# Altium footprint library SBC_PcbLib.PcbLib: 52 footprints (part 2 of 4)
Each footprint in its own frame and in the unit in brackets; x right, y up, seen from the top. Pads: shape width x height; smd on the part's side, far side on the other; paste and mask are expansions set on the pad; w line width, h text height; cw(c..) or ccw(c..) is an arc to the next point about the centre after c.
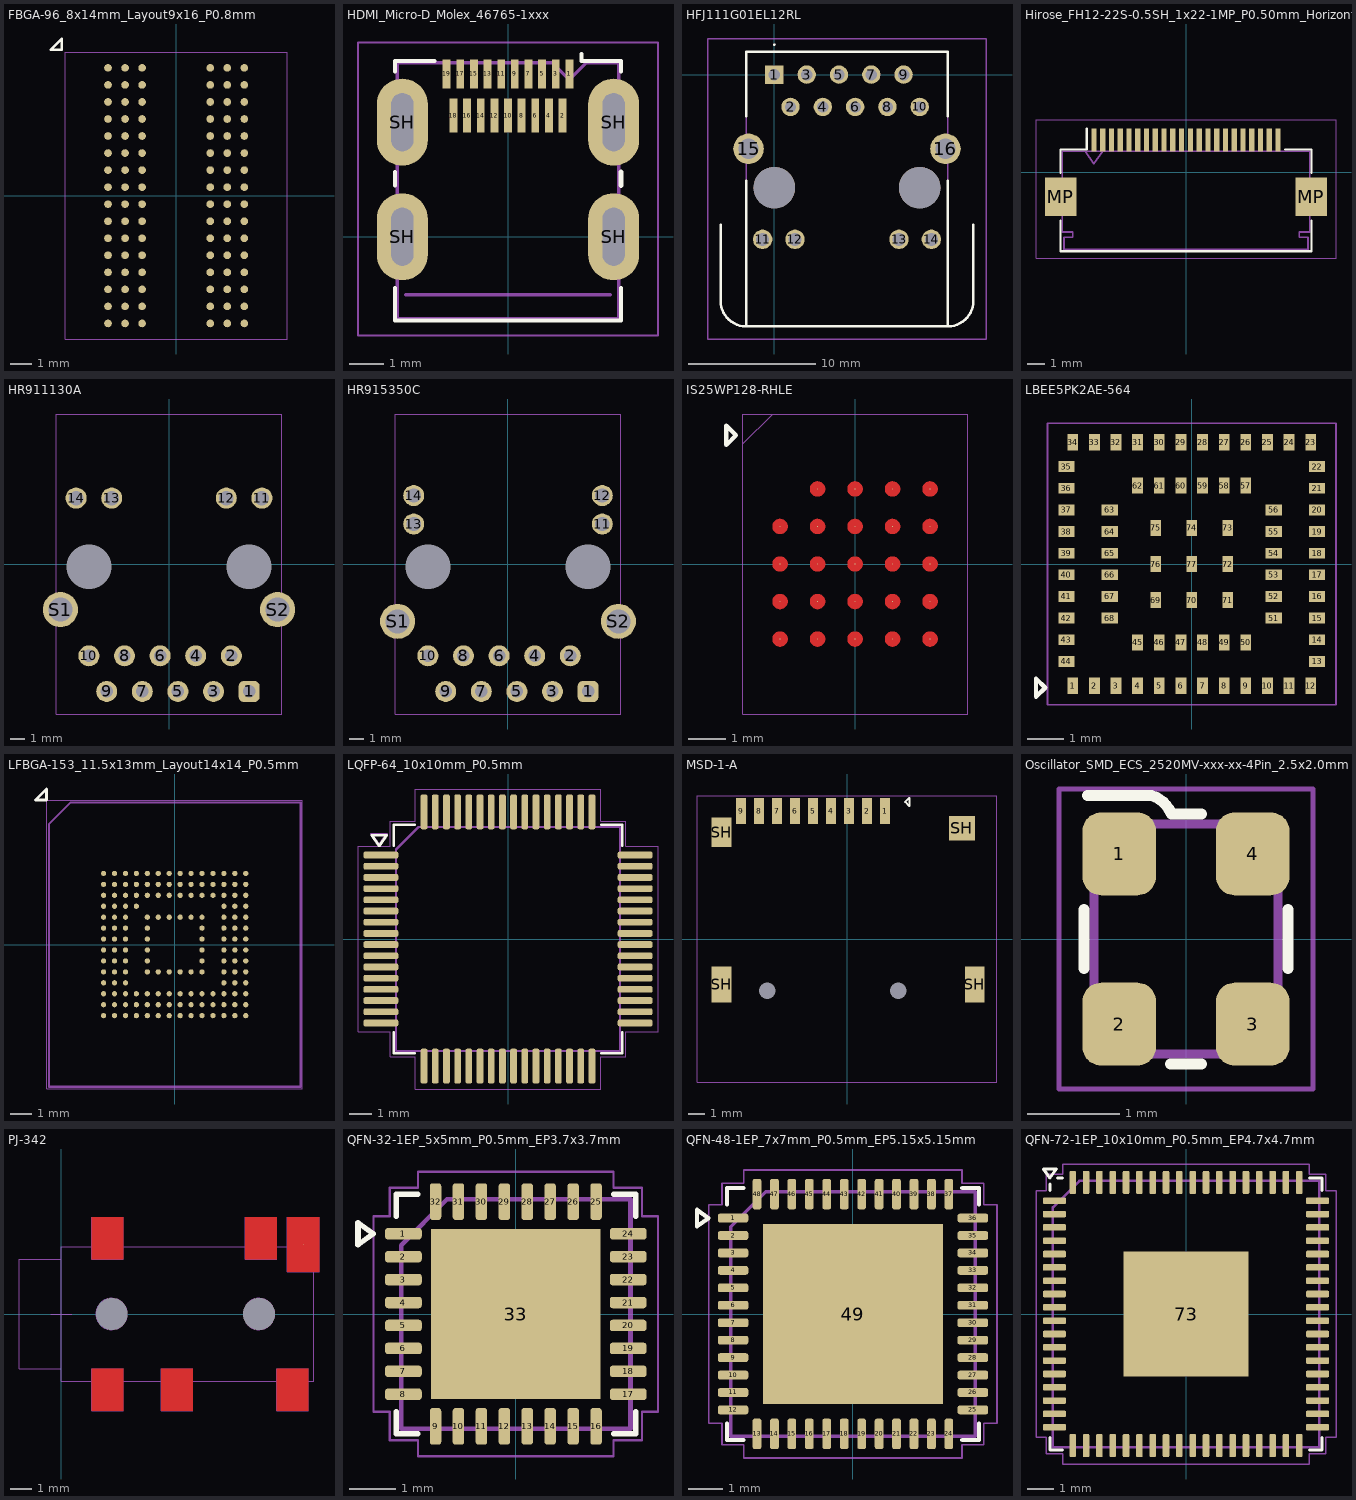
[diagram p1: the footprints below, top view; thin cyan lines are the x and y axes]

## FBGA-96_8x14mm_Layout9x16_P0.8mm [mm] "FBGA-96, 8.0x14.0mm, 96 Ball, 9x16 Layout, 0.8mm Pitch, generalized from https://www.micron.com/-/media/client/global/documents/products/data-sheet/dram/ddr3/4gb_ddr3l.pdf#page=28"
pads (96):
  round 0.36 smd: A1(-3.2,6) A2(-2.4,6) A3(-1.6,6) A7(1.6,6) A8(2.4,6) A9(3.2,6) B1(-3.2,5.2) B2(-2.4,5.2) B3(-1.6,5.2) B7(1.6,5.2) B8(2.4,5.2) B9(3.2,5.2) C1(-3.2,4.4) C2(-2.4,4.4) C3(-1.6,4.4) C7(1.6,4.4) C8(2.4,4.4) C9(3.2,4.4) D1(-3.2,3.6) D2(-2.4,3.6) D3(-1.6,3.6) D7(1.6,3.6) D8(2.4,3.6) D9(3.2,3.6) E1(-3.2,2.8) E2(-2.4,2.8) E3(-1.6,2.8) E7(1.6,2.8) E8(2.4,2.8) E9(3.2,2.8) F1(-3.2,2) F2(-2.4,2) F3(-1.6,2) F7(1.6,2) F8(2.4,2) F9(3.2,2) G1(-3.2,1.2) G2(-2.4,1.2) G3(-1.6,1.2) G7(1.6,1.2) G8(2.4,1.2) G9(3.2,1.2) H1(-3.2,0.4) H2(-2.4,0.4) H3(-1.6,0.4) H7(1.6,0.4) H8(2.4,0.4) H9(3.2,0.4) J1(-3.2,-0.4) J2(-2.4,-0.4) J3(-1.6,-0.4) J7(1.6,-0.4) J8(2.4,-0.4) J9(3.2,-0.4) K1(-3.2,-1.2) K2(-2.4,-1.2) K3(-1.6,-1.2) K7(1.6,-1.2) K8(2.4,-1.2) K9(3.2,-1.2) L1(-3.2,-2) L2(-2.4,-2) L3(-1.6,-2) L7(1.6,-2) L8(2.4,-2) L9(3.2,-2) M1(-3.2,-2.8) M2(-2.4,-2.8) M3(-1.6,-2.8) M7(1.6,-2.8) M8(2.4,-2.8) M9(3.2,-2.8) N1(-3.2,-3.6) N2(-2.4,-3.6) N3(-1.6,-3.6) N7(1.6,-3.6) N8(2.4,-3.6) N9(3.2,-3.6) P1(-3.2,-4.4) P2(-2.4,-4.4) P3(-1.6,-4.4) P7(1.6,-4.4) P8(2.4,-4.4) P9(3.2,-4.4) R1(-3.2,-5.2) R2(-2.4,-5.2) R3(-1.6,-5.2) R7(1.6,-5.2) R8(2.4,-5.2) R9(3.2,-5.2) T1(-3.2,-6) T2(-2.4,-6) T3(-1.6,-6) T7(1.6,-6) T8(2.4,-6) T9(3.2,-6)
Top Overlay:
  lines w0.12: -5.88,6.856 -5.38,7.356 -5.38,6.856 -5.88,6.856
Top Courtyard:
  lines w0.05: -5.207,-6.731 5.207,-6.731 5.207,6.731 -5.207,6.731 -5.207,-6.731
Top Assembly:
  text ".Designator" at -1.905,-1.397 h1
3D body "K4AAG165WA-BCWE.step": height 1.1, standoff 0, extent -5.15,-6.65 5.15,6.65

## HDMI_Micro-D_Molex_46765-1xxx [mm] "HDMI, Micro, Type D, THT, 0.4mm pitch, 19 ckt, right angle (http://www.molex.com/pdm_docs/sd/467651301_sd.pdf)"
pads (23):
  rect 0.23x0.85 smd: 1(1.8,4.775) 3(1.4,4.775) 5(1,4.775) 7(0.6,4.775) 9(0.2,4.775) 11(-0.2,4.775) 13(-0.6,4.775) 15(-1,4.775) 17(-1.4,4.775) 19(-1.8,4.775)
  rect 0.23x1 smd: 2(1.6,3.55) 4(1.2,3.55) 6(0.8,3.55) 8(0.4,3.55) 10(0,3.55) 12(-0.4,3.55) 14(-0.8,3.55) 16(-1.2,3.55) 18(-1.6,3.55)
  oval 1.5x2.55 hole 0.65 slot 1.7 at 90 deg: SH(-3.1,0) SH(-3.1,3.36) SH(3.1,0) SH(3.1,3.36)
Top Overlay:
  lines w0.12: -3.31,-1.5 -3.31,-2.46 3.31,-2.46 3.31,-1.5 ; -3.31,1.5 -3.31,1.9 ; -3.31,4.85 -3.31,5.16 -2.15,5.16 ; 2.15,5.36 2.15,5.16 3.31,5.16 3.31,4.85
  lines w0.15: 3.31,1.5 3.31,1.9
Top Courtyard:
  lines w0.05: -4.4,-2.9 -4.4,5.7 4.4,5.7 4.4,-2.9 -4.4,-2.9
  lines w0.1: 1.3,5.1 1.8,4.6
Bottom Courtyard:
  lines w0.1: -3,-1.7 3,-1.7
Mechanical 5:
  text "KEEPOUT" at -1.96,0.12 h0.7
Top Assembly:
  lines w0.1: 1.3,5.1 -3.25,5.1 -3.25,-2.4 3.25,-2.4 3.25,5.1 2.3,5.1 1.8,4.6
  text ".Designator" at -4.445,-4.064 h1
3D body "HDMI_Micro-D_Molex_46765-1xxx.step": height 2.9, standoff -0.55, extent -3.25,-2.4 3.25,5.1

## HFJ111G01EL12RL [mm] "HFJ11-1G01E-L12RL-1"
pads (18):
  rect 1.446x1.446 hole 0.89: 1(0,0)
  round 1.446 hole 0.89: 2(1.27,-2.54) 3(2.54,0) 4(3.81,-2.54) 5(5.08,0) 6(6.35,-2.54) 7(7.62,0) 8(8.89,-2.54) 9(10.16,0) 10(11.43,-2.54)
  round 1.53 hole 1.02: 11(-0.92,-12.95) 12(1.62,-12.95) 13(9.8,-12.95) 14(12.34,-12.95)
  round 2.4 hole 1.6: 15(-2.035,-5.84) 16(13.455,-5.84)
  round 3.25 hole 3.25 unplated: ""(-0.005,-8.89) ""(11.425,-8.89)
Top Overlay:
  lines w0.1: 0,2.3 ccw(c0,2.35) 0,2.4 ccw(c0,2.35) 0,2.3
  lines w0.2: -4.23,-11.79 -4.23,-17.79 ccw(c-2.23,-17.79) -2.23,-19.79 ; -2.23,-8.36 -2.23,-19.79 ; -2.23,-3.28 -2.23,1.8 13.65,1.8 13.65,-3.28 ; 13.65,-8.36 13.65,-19.79 ; 15.65,-11.79 15.65,-17.79 cw(c13.65,-17.79) 13.65,-19.79 ; -2.23,-19.79 13.65,-19.79
  text ".Designator" at -0.381,-16.764 h1.27
Mechanical 2:
  lines w0.1: -4.23,-11.79 -4.23,-17.79 ccw(c-2.23,-17.79) -2.23,-19.79 ; 15.65,-11.79 15.65,-17.79 cw(c13.65,-17.79) 13.65,-19.79 ; -2.23,-19.79 -2.23,1.8 13.65,1.8 13.65,-19.79 ; -2.23,-19.79 13.65,-19.79
  text ".Designator" at -0.381,-16.764 h1.27
Mechanical 15:
  lines w0.1: -5.23,-20.79 -5.23,2.8 16.65,2.8 16.65,-20.79 -5.23,-20.79
3D body "HFJ11-1G01E-L12RL.stp": height 15.41, standoff -4, extent -4.105,-19.685 15.789,1.905

## Hirose_FH12-22S-0.5SH_1x22-1MP_P0.50mm_Horizontal [mm] "Hirose FH12, FFC/FPC connector, FH12-22S-0.5SH, 22 Pins per row (https://www.hirose.com/product/en/products/FH12/FH12-24S-0.5SH(55)/)"
pads (24):
  rect 0.3x1.3 smd: 1(-5.25,1.85) 2(-4.75,1.85) 3(-4.25,1.85) 4(-3.75,1.85) 5(-3.25,1.85) 6(-2.75,1.85) 7(-2.25,1.85) 8(-1.75,1.85) 9(-1.25,1.85) 10(-0.75,1.85) 11(-0.25,1.85) 12(0.25,1.85) 13(0.75,1.85) 14(1.25,1.85) 15(1.75,1.85) 16(2.25,1.85) 17(2.75,1.85) 18(3.25,1.85) 19(3.75,1.85) 20(4.25,1.85) 21(4.75,1.85) 22(5.25,1.85)
  rect 1.8x2.2 smd: MP(-7.15,-1.4) MP(7.15,-1.4)
Top Overlay:
  lines w0.12: -7.15,-2.76 -7.15,-4.5 7.15,-4.5 7.15,-2.76 ; -7.15,-0.04 -7.15,1.3 -5.66,1.3 -5.66,2.5 ; 5.66,1.3 7.15,1.3 7.15,-0.04
  text ".Designator" at -1.2,3.2 h1
Mechanical 2:
  lines w0.1: -5.75,1.2 -5.25,0.493 -4.75,1.2 ; -7.05,-3.4 -7.05,1.2 0,1.2 7.05,1.2 7.05,-3.4 6.45,-3.4 6.45,-3.7 6.95,-3.7 6.95,-4.4 0,-4.4 -6.95,-4.4 -6.95,-3.7 -6.45,-3.7 -6.45,-3.4 -7.05,-3.4
  text ".Designator" at -1.2,-4.2 h1
  text ".Comment" at -2.4,-6.1 h1
Mechanical 15:
  lines w0.05: -8.55,-4.9 8.55,-4.9 8.55,3 -8.55,3 -8.55,-4.9
3D body "524352271.stp": height 2.17, standoff 0.01, extent -8.8,-3.286 8.8,1.914

## HR911130A [mm]
pads (18):
  rrect50% 1.5x1.5 hole 0.89: 1(5.716,-9.09)
  round 1.5 hole 0.89: 2(4.446,-6.55) 3(3.176,-9.09) 4(1.906,-6.55) 5(0.636,-9.09) 6(-0.634,-6.55) 7(-1.904,-9.09) 8(-3.174,-6.55) 9(-4.444,-9.09) 10(-5.714,-6.55)
  round 1.5 hole 1.02: 11(6.625,4.7) 12(4.085,4.7) 13(-4.085,4.7) 14(-6.625,4.7)
  round 0 hole 3.2 unplated: M1(-5.712,-0.2) M2(5.718,-0.2)
  round 2.5 hole 1.7: S1(-7.745,-3.25) S2(7.745,-3.25)
Top Courtyard:
  lines w0.05: -8.05,-10.7 8.05,-10.7 8.05,10.7 -8.05,10.7 -8.05,-10.7
Top Assembly:
  text ".Designator" at -1.905,-2.667 h0.5
3D body "HR911130A.STEP": height 13.51, standoff -2.99, extent -8.006,-10.7 7.874,10.7

## HR915350C [mm]
pads (18):
  rrect50% 1.5x1.5 hole 0.89: 1(5.716,-9.09)
  round 1.5 hole 0.89: 2(4.446,-6.55) 3(3.176,-9.09) 4(1.906,-6.55) 5(0.636,-9.09) 6(-0.634,-6.55) 7(-1.904,-9.09) 8(-3.174,-6.55) 9(-4.444,-9.09) 10(-5.714,-6.55)
  round 1.5 hole 1.02: 11(6.726,2.85) 12(6.726,4.88) 13(-6.724,2.85) 14(-6.724,4.88)
  round 0 hole 3.2 unplated: M1(-5.712,-0.2) M2(5.718,-0.2)
  round 2.5 hole 1.7: S1(-7.873,-4.09) S2(7.877,-4.09)
Top Courtyard:
  lines w0.05: -8.05,-10.7 -8.05,10.7 8.05,10.7 8.05,-10.7 -8.05,-10.7
Top Assembly:
  text ".Designator" at -1.905,-2.667 h0.5
3D body "LPJG16515A4NL.STEP": height 15.44, standoff -3.44, extent -9.652,-10.523 9.456,10.777

## IS25WP128-RHLE [mil]
pads (24):
  round 1 smd: A2(-39.36,78.74) A3(0.01,78.74) A4(39.38,78.74) A5(78.75,78.74) B1(-78.73,39.37) B2(-39.36,39.37) B3(0.01,39.37) B4(39.38,39.37) B5(78.75,39.37) C(78.75,0) C1(-78.73,0) C2(-39.36,0) C3(0.01,0) C4(39.38,0) D1(-78.73,-39.37) D2(-39.36,-39.37) D3(0.01,-39.37) D4(39.38,-39.37) D5(78.75,-39.37) E1(-78.73,-78.74) E2(-39.36,-78.74) E3(0.01,-78.74) E4(39.38,-78.74) E5(78.75,-78.74)
Top Layer:
  region: 70.87,-78.74 70.87,-79.52 71.17,-81.04 71.76,-82.47 72.62,-83.76 73.72,-84.86 75.01,-85.72 76.44,-86.31 77.96,-86.61 78.74,-86.61 79.52,-86.61 81.04,-86.31 82.47,-85.72 83.76,-84.86 84.86,-83.76 85.72,-82.47 86.31,-81.04 86.61,-79.52 86.61,-78.74 86.61,-77.96 86.31,-76.44 85.72,-75.01 84.86,-73.72 83.76,-72.62 82.47,-71.76 81.04,-71.17 79.52,-70.87 78.74,-70.87 77.96,-70.87 76.44,-71.17 75.01,-71.76 73.72,-72.62 72.62,-73.72 71.76,-75.01 71.17,-76.44 70.87,-77.96
  region: 31.5,-78.74 31.5,-79.52 31.8,-81.04 32.39,-82.47 33.25,-83.76 34.35,-84.86 35.64,-85.72 37.07,-86.31 38.59,-86.61 39.37,-86.61 40.15,-86.61 41.67,-86.31 43.1,-85.72 44.39,-84.86 45.49,-83.76 46.35,-82.47 46.94,-81.04 47.24,-79.52 47.24,-78.74 47.24,-77.96 46.94,-76.44 46.35,-75.01 45.49,-73.72 44.39,-72.62 43.1,-71.76 41.67,-71.17 40.15,-70.87 39.37,-70.87 38.59,-70.87 37.07,-71.17 35.64,-71.76 34.35,-72.62 33.25,-73.72 32.39,-75.01 31.8,-76.44 31.5,-77.96
  region: -7.87,-78.74 -7.87,-79.52 -7.57,-81.04 -6.98,-82.47 -6.12,-83.76 -5.02,-84.86 -3.73,-85.72 -2.3,-86.31 -0.78,-86.61 0,-86.61 0.78,-86.61 2.3,-86.31 3.73,-85.72 5.02,-84.86 6.12,-83.76 6.98,-82.47 7.57,-81.04 7.87,-79.52 7.87,-78.74 7.87,-77.96 7.57,-76.44 6.98,-75.01 6.12,-73.72 5.02,-72.62 3.73,-71.76 2.3,-71.17 0.78,-70.87 0,-70.87 -0.78,-70.87 -2.3,-71.17 -3.73,-71.76 -5.02,-72.62 -6.12,-73.72 -6.98,-75.01 -7.57,-76.44 -7.87,-77.96
  region: -47.24,-78.74 -47.24,-79.52 -46.94,-81.04 -46.35,-82.47 -45.49,-83.76 -44.39,-84.86 -43.1,-85.72 -41.67,-86.31 -40.15,-86.61 -39.37,-86.61 -38.59,-86.61 -37.07,-86.31 -35.64,-85.72 -34.35,-84.86 -33.25,-83.76 -32.39,-82.47 -31.8,-81.04 -31.5,-79.52 -31.5,-78.74 -31.5,-77.96 -31.8,-76.44 -32.39,-75.01 -33.25,-73.72 -34.35,-72.62 -35.64,-71.76 -37.07,-71.17 -38.59,-70.87 -39.37,-70.87 -40.15,-70.87 -41.67,-71.17 -43.1,-71.76 -44.39,-72.62 -45.49,-73.72 -46.35,-75.01 -46.94,-76.44 -47.24,-77.96
  region: -78.74,-86.61 -79.52,-86.61 -81.04,-86.31 -82.47,-85.72 -83.76,-84.86 -84.86,-83.76 -85.72,-82.47 -86.31,-81.04 -86.61,-79.52 -86.61,-78.74 -86.61,-77.96 -86.31,-76.44 -85.72,-75.01 -84.86,-73.72 -83.76,-72.62 -82.47,-71.76 -81.04,-71.17 -79.52,-70.87 -78.74,-70.87 -77.96,-70.87 -76.44,-71.17 -75.01,-71.76 -73.72,-72.62 -72.62,-73.72 -71.76,-75.01 -71.17,-76.44 -70.87,-77.96 -70.87,-78.74 -70.87,-79.52 -71.17,-81.04 -71.76,-82.47 -72.62,-83.76 -73.72,-84.86 -75.01,-85.72 -76.44,-86.31 -77.96,-86.61
  region: 70.87,-39.37 70.87,-40.15 71.17,-41.67 71.76,-43.1 72.62,-44.39 73.72,-45.49 75.01,-46.35 76.44,-46.94 77.96,-47.24 78.74,-47.24 79.52,-47.24 81.04,-46.94 82.47,-46.35 83.76,-45.49 84.86,-44.39 85.72,-43.1 86.31,-41.67 86.61,-40.15 86.61,-39.37 86.61,-38.59 86.31,-37.07 85.72,-35.64 84.86,-34.35 83.76,-33.25 82.47,-32.39 81.04,-31.8 79.52,-31.5 78.74,-31.5 77.96,-31.5 76.44,-31.8 75.01,-32.39 73.72,-33.25 72.62,-34.35 71.76,-35.64 71.17,-37.07 70.87,-38.59
  region: 31.5,-39.37 31.5,-40.15 31.8,-41.67 32.39,-43.1 33.25,-44.39 34.35,-45.49 35.64,-46.35 37.07,-46.94 38.59,-47.24 39.37,-47.24 40.15,-47.24 41.67,-46.94 43.1,-46.35 44.39,-45.49 45.49,-44.39 46.35,-43.1 46.94,-41.67 47.24,-40.15 47.24,-39.37 47.24,-38.59 46.94,-37.07 46.35,-35.64 45.49,-34.35 44.39,-33.25 43.1,-32.39 41.67,-31.8 40.15,-31.5 39.37,-31.5 38.59,-31.5 37.07,-31.8 35.64,-32.39 34.35,-33.25 33.25,-34.35 32.39,-35.64 31.8,-37.07 31.5,-38.59
  region: -7.87,-39.37 -7.87,-40.15 -7.57,-41.67 -6.98,-43.1 -6.12,-44.39 -5.02,-45.49 -3.73,-46.35 -2.3,-46.94 -0.78,-47.24 0,-47.24 0.78,-47.24 2.3,-46.94 3.73,-46.35 5.02,-45.49 6.12,-44.39 6.98,-43.1 7.57,-41.67 7.87,-40.15 7.87,-39.37 7.87,-38.59 7.57,-37.07 6.98,-35.64 6.12,-34.35 5.02,-33.25 3.73,-32.39 2.3,-31.8 0.78,-31.5 0,-31.5 -0.78,-31.5 -2.3,-31.8 -3.73,-32.39 -5.02,-33.25 -6.12,-34.35 -6.98,-35.64 -7.57,-37.07 -7.87,-38.59
  region: -39.37,-47.24 -40.15,-47.24 -41.67,-46.94 -43.1,-46.35 -44.39,-45.49 -45.49,-44.39 -46.35,-43.1 -46.94,-41.67 -47.24,-40.15 -47.24,-39.37 -47.24,-38.59 -46.94,-37.07 -46.35,-35.64 -45.49,-34.35 -44.39,-33.25 -43.1,-32.39 -41.67,-31.8 -40.15,-31.5 -39.37,-31.5 -38.59,-31.5 -37.07,-31.8 -35.64,-32.39 -34.35,-33.25 -33.25,-34.35 -32.39,-35.64 -31.8,-37.07 -31.5,-38.59 -31.5,-39.37 -31.5,-40.15 -31.8,-41.67 -32.39,-43.1 -33.25,-44.39 -34.35,-45.49 -35.64,-46.35 -37.07,-46.94 -38.59,-47.24
  region: -78.74,-47.24 -79.52,-47.24 -81.04,-46.94 -82.47,-46.35 -83.76,-45.49 -84.86,-44.39 -85.72,-43.1 -86.31,-41.67 -86.61,-40.15 -86.61,-39.37 -86.61,-38.59 -86.31,-37.07 -85.72,-35.64 -84.86,-34.35 -83.76,-33.25 -82.47,-32.39 -81.04,-31.8 -79.52,-31.5 -78.74,-31.5 -77.96,-31.5 -76.44,-31.8 -75.01,-32.39 -73.72,-33.25 -72.62,-34.35 -71.76,-35.64 -71.17,-37.07 -70.87,-38.59 -70.87,-39.37 -70.87,-40.15 -71.17,-41.67 -71.76,-43.1 -72.62,-44.39 -73.72,-45.49 -75.01,-46.35 -76.44,-46.94 -77.96,-47.24
  region: 70.87,0 70.87,-0.78 71.17,-2.3 71.76,-3.73 72.62,-5.02 73.72,-6.12 75.01,-6.98 76.44,-7.57 77.96,-7.87 78.74,-7.87 79.52,-7.87 81.04,-7.57 82.47,-6.98 83.76,-6.12 84.86,-5.02 85.72,-3.73 86.31,-2.3 86.61,-0.78 86.61,0 86.61,0.78 86.31,2.3 85.72,3.73 84.86,5.02 83.76,6.12 82.47,6.98 81.04,7.57 79.52,7.87 78.74,7.87 77.96,7.87 76.44,7.57 75.01,6.98 73.72,6.12 72.62,5.02 71.76,3.73 71.17,2.3 70.87,0.78
  region: 31.5,0 31.5,-0.78 31.8,-2.3 32.39,-3.73 33.25,-5.02 34.35,-6.12 35.64,-6.98 37.07,-7.57 38.59,-7.87 39.37,-7.87 40.15,-7.87 41.67,-7.57 43.1,-6.98 44.39,-6.12 45.49,-5.02 46.35,-3.73 46.94,-2.3 47.24,-0.78 47.24,0 47.24,0.78 46.94,2.3 46.35,3.73 45.49,5.02 44.39,6.12 43.1,6.98 41.67,7.57 40.15,7.87 39.37,7.87 38.59,7.87 37.07,7.57 35.64,6.98 34.35,6.12 33.25,5.02 32.39,3.73 31.8,2.3 31.5,0.78
  region: 0,-7.87 -0.78,-7.87 -2.3,-7.57 -3.73,-6.98 -5.02,-6.12 -6.12,-5.02 -6.98,-3.73 -7.57,-2.3 -7.87,-0.78 -7.87,0 -7.87,0.78 -7.57,2.3 -6.98,3.73 -6.12,5.02 -5.02,6.12 -3.73,6.98 -2.3,7.57 -0.78,7.87 0,7.87 0.78,7.87 2.3,7.57 3.73,6.98 5.02,6.12 6.12,5.02 6.98,3.73 7.57,2.3 7.87,0.78 7.87,0 7.87,-0.78 7.57,-2.3 6.98,-3.73 6.12,-5.02 5.02,-6.12 3.73,-6.98 2.3,-7.57 0.78,-7.87
  region: -39.37,-7.87 -40.15,-7.87 -41.67,-7.57 -43.1,-6.98 -44.39,-6.12 -45.49,-5.02 -46.35,-3.73 -46.94,-2.3 -47.24,-0.78 -47.24,0 -47.24,0.78 -46.94,2.3 -46.35,3.73 -45.49,5.02 -44.39,6.12 -43.1,6.98 -41.67,7.57 -40.15,7.87 -39.37,7.87 -38.59,7.87 -37.07,7.57 -35.64,6.98 -34.35,6.12 -33.25,5.02 -32.39,3.73 -31.8,2.3 -31.5,0.78 -31.5,0 -31.5,-0.78 -31.8,-2.3 -32.39,-3.73 -33.25,-5.02 -34.35,-6.12 -35.64,-6.98 -37.07,-7.57 -38.59,-7.87
  region: -78.74,-7.87 -79.52,-7.87 -81.04,-7.57 -82.47,-6.98 -83.76,-6.12 -84.86,-5.02 -85.72,-3.73 -86.31,-2.3 -86.61,-0.78 -86.61,0 -86.61,0.78 -86.31,2.3 -85.72,3.73 -84.86,5.02 -83.76,6.12 -82.47,6.98 -81.04,7.57 -79.52,7.87 -78.74,7.87 -77.96,7.87 -76.44,7.57 -75.01,6.98 -73.72,6.12 -72.62,5.02 -71.76,3.73 -71.17,2.3 -70.87,0.78 -70.87,0 -70.87,-0.78 -71.17,-2.3 -71.76,-3.73 -72.62,-5.02 -73.72,-6.12 -75.01,-6.98 -76.44,-7.57 -77.96,-7.87
  region: 70.87,39.37 70.87,38.59 71.17,37.07 71.76,35.64 72.62,34.35 73.72,33.25 75.01,32.39 76.44,31.8 77.96,31.5 78.74,31.5 79.52,31.5 81.04,31.8 82.47,32.39 83.76,33.25 84.86,34.35 85.72,35.64 86.31,37.07 86.61,38.59 86.61,39.37 86.61,40.15 86.31,41.67 85.72,43.1 84.86,44.39 83.76,45.49 82.47,46.35 81.04,46.94 79.52,47.24 78.74,47.24 77.96,47.24 76.44,46.94 75.01,46.35 73.72,45.49 72.62,44.39 71.76,43.1 71.17,41.67 70.87,40.15
  region: 39.37,31.5 38.59,31.5 37.07,31.8 35.64,32.39 34.35,33.25 33.25,34.35 32.39,35.64 31.8,37.07 31.5,38.59 31.5,39.37 31.5,40.15 31.8,41.67 32.39,43.1 33.25,44.39 34.35,45.49 35.64,46.35 37.07,46.94 38.59,47.24 39.37,47.24 40.15,47.24 41.67,46.94 43.1,46.35 44.39,45.49 45.49,44.39 46.35,43.1 46.94,41.67 47.24,40.15 47.24,39.37 47.24,38.59 46.94,37.07 46.35,35.64 45.49,34.35 44.39,33.25 43.1,32.39 41.67,31.8 40.15,31.5
  region: 0,31.5 -0.78,31.5 -2.3,31.8 -3.73,32.39 -5.02,33.25 -6.12,34.35 -6.98,35.64 -7.57,37.07 -7.87,38.59 -7.87,39.37 -7.87,40.15 -7.57,41.67 -6.98,43.1 -6.12,44.39 -5.02,45.49 -3.73,46.35 -2.3,46.94 -0.78,47.24 0,47.24 0.78,47.24 2.3,46.94 3.73,46.35 5.02,45.49 6.12,44.39 6.98,43.1 7.57,41.67 7.87,40.15 7.87,39.37 7.87,38.59 7.57,37.07 6.98,35.64 6.12,34.35 5.02,33.25 3.73,32.39 2.3,31.8 0.78,31.5
  region: -39.37,31.5 -40.15,31.5 -41.67,31.8 -43.1,32.39 -44.39,33.25 -45.49,34.35 -46.35,35.64 -46.94,37.07 -47.24,38.59 -47.24,39.37 -47.24,40.15 -46.94,41.67 -46.35,43.1 -45.49,44.39 -44.39,45.49 -43.1,46.35 -41.67,46.94 -40.15,47.24 -39.37,47.24 -38.59,47.24 -37.07,46.94 -35.64,46.35 -34.35,45.49 -33.25,44.39 -32.39,43.1 -31.8,41.67 -31.5,40.15 -31.5,39.37 -31.5,38.59 -31.8,37.07 -32.39,35.64 -33.25,34.35 -34.35,33.25 -35.64,32.39 -37.07,31.8 -38.59,31.5
  region: -78.74,31.5 -79.52,31.5 -81.04,31.8 -82.47,32.39 -83.76,33.25 -84.86,34.35 -85.72,35.64 -86.31,37.07 -86.61,38.59 -86.61,39.37 -86.61,40.15 -86.31,41.67 -85.72,43.1 -84.86,44.39 -83.76,45.49 -82.47,46.35 -81.04,46.94 -79.52,47.24 -78.74,47.24 -77.96,47.24 -76.44,46.94 -75.01,46.35 -73.72,45.49 -72.62,44.39 -71.76,43.1 -71.17,41.67 -70.87,40.15 -70.87,39.37 -70.87,38.59 -71.17,37.07 -71.76,35.64 -72.62,34.35 -73.72,33.25 -75.01,32.39 -76.44,31.8 -77.96,31.5
  region: 78.74,70.87 77.96,70.87 76.44,71.17 75.01,71.76 73.72,72.62 72.62,73.72 71.76,75.01 71.17,76.44 70.87,77.96 70.87,78.74 70.87,79.52 71.17,81.04 71.76,82.47 72.62,83.76 73.72,84.86 75.01,85.72 76.44,86.31 77.96,86.61 78.74,86.61 79.52,86.61 81.04,86.31 82.47,85.72 83.76,84.86 84.86,83.76 85.72,82.47 86.31,81.04 86.61,79.52 86.61,78.74 86.61,77.96 86.31,76.44 85.72,75.01 84.86,73.72 83.76,72.62 82.47,71.76 81.04,71.17 79.52,70.87
  region: 39.37,70.87 38.59,70.87 37.07,71.17 35.64,71.76 34.35,72.62 33.25,73.72 32.39,75.01 31.8,76.44 31.5,77.96 31.5,78.74 31.5,79.52 31.8,81.04 32.39,82.47 33.25,83.76 34.35,84.86 35.64,85.72 37.07,86.31 38.59,86.61 39.37,86.61 40.15,86.61 41.67,86.31 43.1,85.72 44.39,84.86 45.49,83.76 46.35,82.47 46.94,81.04 47.24,79.52 47.24,78.74 47.24,77.96 46.94,76.44 46.35,75.01 45.49,73.72 44.39,72.62 43.1,71.76 41.67,71.17 40.15,70.87
  region: 0,70.87 -0.78,70.87 -2.3,71.17 -3.73,71.76 -5.02,72.62 -6.12,73.72 -6.98,75.01 -7.57,76.44 -7.87,77.96 -7.87,78.74 -7.87,79.52 -7.57,81.04 -6.98,82.47 -6.12,83.76 -5.02,84.86 -3.73,85.72 -2.3,86.31 -0.78,86.61 0,86.61 0.78,86.61 2.3,86.31 3.73,85.72 5.02,84.86 6.12,83.76 6.98,82.47 7.57,81.04 7.87,79.52 7.87,78.74 7.87,77.96 7.57,76.44 6.98,75.01 6.12,73.72 5.02,72.62 3.73,71.76 2.3,71.17 0.78,70.87
  region: -39.37,70.87 -40.15,70.87 -41.67,71.17 -43.1,71.76 -44.39,72.62 -45.49,73.72 -46.35,75.01 -46.94,76.44 -47.24,77.96 -47.24,78.74 -47.24,79.52 -46.94,81.04 -46.35,82.47 -45.49,83.76 -44.39,84.86 -43.1,85.72 -41.67,86.31 -40.15,86.61 -39.37,86.61 -38.59,86.61 -37.07,86.31 -35.64,85.72 -34.35,84.86 -33.25,83.76 -32.39,82.47 -31.8,81.04 -31.5,79.52 -31.5,78.74 -31.5,77.96 -31.8,76.44 -32.39,75.01 -33.25,73.72 -34.35,72.62 -35.64,71.76 -37.07,71.17 -38.59,70.87
Top Overlay:
  lines w4.72: -135,125 -135,145 -125,135 -135,125
Top Courtyard:
  lines w0.5: -118.11,-157.48 -118.11,157.48 118.11,157.48 118.11,-157.48 -118.11,-157.48
Top Assembly:
  lines w0.5: -118.11,125.98 -86.61,157.48 ; -118.11,-157.48 118.11,-157.48 118.11,157.48 -118.11,157.48 -118.11,-157.48
3D body "IS25WP128-RHLE.step": height 47.24, standoff 0, extent -118.11,-157.48 118.11,157.48

## LBEE5PK2AE-564 [mm]
pads (77):
  rect 0.3x0.45 smd: 1(-3.3,-3.375) 2(-2.7,-3.375) 3(-2.1,-3.375) 4(-1.5,-3.375) 5(-0.9,-3.375) 6(-0.3,-3.375) 7(0.3,-3.375) 8(0.9,-3.375) 9(1.5,-3.375) 10(2.1,-3.375) 11(2.7,-3.375) 12(3.3,-3.375) 23(3.3,3.375) 24(2.7,3.375) 25(2.1,3.375) 26(1.5,3.375) 27(0.9,3.375) 28(0.3,3.375) 29(-0.3,3.375) 30(-0.9,3.375) 31(-1.5,3.375) 32(-2.1,3.375) 33(-2.7,3.375) 34(-3.3,3.375) 45(-1.5,-2.175) 46(-0.9,-2.175) 47(-0.3,-2.175) 48(0.3,-2.175) 49(0.9,-2.175) 50(1.5,-2.175) 57(1.5,2.175) 58(0.9,2.175) 59(0.3,2.175) 60(-0.3,2.175) 61(-0.9,2.175) 62(-1.5,2.175) 69(-1,-1) 70(0,-1) 71(1,-1) 72(1,0) 73(1,1) 74(0,1) 75(-1,1) 76(-1,0) 77(0,0)
  rect 0.45x0.3 smd: 13(3.475,-2.7) 14(3.475,-2.1) 15(3.475,-1.5) 16(3.475,-0.9) 17(3.475,-0.3) 18(3.475,0.3) 19(3.475,0.9) 20(3.475,1.5) 21(3.475,2.1) 22(3.475,2.7) 35(-3.475,2.7) 36(-3.475,2.1) 37(-3.475,1.5) 38(-3.475,0.9) 39(-3.475,0.3) 40(-3.475,-0.3) 41(-3.475,-0.9) 42(-3.475,-1.5) 43(-3.475,-2.1) 44(-3.475,-2.7) 51(2.275,-1.5) 52(2.275,-0.9) 53(2.275,-0.3) 54(2.275,0.3) 55(2.275,0.9) 56(2.275,1.5) 63(-2.275,1.5) 64(-2.275,0.9) 65(-2.275,0.3) 66(-2.275,-0.3) 67(-2.275,-0.9) 68(-2.275,-1.5)
Top Overlay:
  lines w0.12: -4.318,-3.683 -4.064,-3.429 -4.318,-3.175 -4.318,-3.683
Top Courtyard:
  lines w0.05: -4,-3.9 -4,3.9 4,3.9 4,-3.9 -4,-3.9
3D body "LBEE5PK2AE-564.step": height 1.19, standoff 0, extent -4,-3.9 4,3.9

## LFBGA-153_11.5x13mm_Layout14x14_P0.5mm [mm] "JEDEC eMMC AN BGA-153, 11.5x13.0mm, 153 Ball, 14x14 Layout, 0.5mm Pitch, https://www.jedec.org/sites/default/files/docs/MO-276F.pdf"
pads (153):
  round 0.24 smd: A1(-3.25,3.25) A2(-2.75,3.25) A3(-2.25,3.25) A4(-1.75,3.25) A5(-1.25,3.25) A6(-0.75,3.25) A7(-0.25,3.25) A8(0.25,3.25) A9(0.75,3.25) A10(1.25,3.25) A11(1.75,3.25) A12(2.25,3.25) A13(2.75,3.25) A14(3.25,3.25) B1(-3.25,2.75) B2(-2.75,2.75) B3(-2.25,2.75) B4(-1.75,2.75) B5(-1.25,2.75) B6(-0.75,2.75) B7(-0.25,2.75) B8(0.25,2.75) B9(0.75,2.75) B10(1.25,2.75) B11(1.75,2.75) B12(2.25,2.75) B13(2.75,2.75) B14(3.25,2.75) C1(-3.25,2.25) C2(-2.75,2.25) C3(-2.25,2.25) C4(-1.75,2.25) C5(-1.25,2.25) C6(-0.75,2.25) C7(-0.25,2.25) C8(0.25,2.25) C9(0.75,2.25) C10(1.25,2.25) C11(1.75,2.25) C12(2.25,2.25) C13(2.75,2.25) C14(3.25,2.25) D1(-3.25,1.75) D2(-2.75,1.75) D3(-2.25,1.75) D4(-1.75,1.75) D12(2.25,1.75) D13(2.75,1.75) D14(3.25,1.75) E1(-3.25,1.25) E2(-2.75,1.25) E3(-2.25,1.25) E5(-1.25,1.25) E6(-0.75,1.25) E7(-0.25,1.25) E8(0.25,1.25) E9(0.75,1.25) E10(1.25,1.25) E12(2.25,1.25) E13(2.75,1.25) E14(3.25,1.25) F1(-3.25,0.75) F2(-2.75,0.75) F3(-2.25,0.75) F5(-1.25,0.75) F10(1.25,0.75) F12(2.25,0.75) F13(2.75,0.75) F14(3.25,0.75) G1(-3.25,0.25) G2(-2.75,0.25) G3(-2.25,0.25) G5(-1.25,0.25) G10(1.25,0.25) G12(2.25,0.25) G13(2.75,0.25) G14(3.25,0.25) H1(-3.25,-0.25) H2(-2.75,-0.25) H3(-2.25,-0.25) H5(-1.25,-0.25) H10(1.25,-0.25) H12(2.25,-0.25) H13(2.75,-0.25) H14(3.25,-0.25) J1(-3.25,-0.75) J2(-2.75,-0.75) J3(-2.25,-0.75) J5(-1.25,-0.75) J10(1.25,-0.75) J12(2.25,-0.75) J13(2.75,-0.75) J14(3.25,-0.75) K1(-3.25,-1.25) K2(-2.75,-1.25) K3(-2.25,-1.25) K5(-1.25,-1.25) K6(-0.75,-1.25) K7(-0.25,-1.25) K8(0.25,-1.25) K9(0.75,-1.25) K10(1.25,-1.25) K12(2.25,-1.25) K13(2.75,-1.25) K14(3.25,-1.25) L1(-3.25,-1.75) L2(-2.75,-1.75) L3(-2.25,-1.75) L12(2.25,-1.75) L13(2.75,-1.75) L14(3.25,-1.75) M1(-3.25,-2.25) M2(-2.75,-2.25) M3(-2.25,-2.25) M4(-1.75,-2.25) M5(-1.25,-2.25) M6(-0.75,-2.25) M7(-0.25,-2.25) M8(0.25,-2.25) M9(0.75,-2.25) M10(1.25,-2.25) M11(1.75,-2.25) M12(2.25,-2.25) M13(2.75,-2.25) M14(3.25,-2.25) N1(-3.25,-2.75) N2(-2.75,-2.75) N3(-2.25,-2.75) N4(-1.75,-2.75) N5(-1.25,-2.75) N6(-0.75,-2.75) N7(-0.25,-2.75) N8(0.25,-2.75) N9(0.75,-2.75) N10(1.25,-2.75) N11(1.75,-2.75) N12(2.25,-2.75) N13(2.75,-2.75) N14(3.25,-2.75) P1(-3.25,-3.25) P2(-2.75,-3.25) P3(-2.25,-3.25) P4(-1.75,-3.25) P5(-1.25,-3.25) P6(-0.75,-3.25) P7(-0.25,-3.25) P8(0.25,-3.25) P9(0.75,-3.25) P10(1.25,-3.25) P11(1.75,-3.25) P12(2.25,-3.25) P13(2.75,-3.25) P14(3.25,-3.25)
Top Overlay:
  lines w0.12: -6.36,6.61 -5.86,7.11 -5.86,6.61 -6.36,6.61
Top Courtyard:
  lines w0.05: -5.842,-6.604 5.842,-6.604 5.842,6.604 -5.842,6.604 -5.842,-6.604
Top Assembly:
  lines w0.1: -5.75,-6.5 -5.75,5.5 -4.75,6.5 5.75,6.5 5.75,-6.5 -5.75,-6.5
  text ".Designator" at -4.699,-2.159 h1
3D body "KLMBG2JETD-B041.step": height 0.8, standoff 0, extent -5.75,-6.5 5.75,6.5

## LQFP-64_10x10mm_P0.5mm [mm] "LQFP, 64 Pin (https://www.analog.com/media/en/technical-documentation/data-sheets/ad7606_7606-6_7606-4.pdf)"
pads (64):
  rrect50% 1.55x0.3 smd: 1(-5.675,3.75) 2(-5.675,3.25) 3(-5.675,2.75) 4(-5.675,2.25) 5(-5.675,1.75) 6(-5.675,1.25) 7(-5.675,0.75) 8(-5.675,0.25) 9(-5.675,-0.25) 10(-5.675,-0.75) 11(-5.675,-1.25) 12(-5.675,-1.75) 13(-5.675,-2.25) 14(-5.675,-2.75) 15(-5.675,-3.25) 16(-5.675,-3.75) 33(5.675,-3.75) 34(5.675,-3.25) 35(5.675,-2.75) 36(5.675,-2.25) 37(5.675,-1.75) 38(5.675,-1.25) 39(5.675,-0.75) 40(5.675,-0.25) 41(5.675,0.25) 42(5.675,0.75) 43(5.675,1.25) 44(5.675,1.75) 45(5.675,2.25) 46(5.675,2.75) 47(5.675,3.25) 48(5.675,3.75)
  rrect50% 0.3x1.55 smd: 17(-3.75,-5.675) 18(-3.25,-5.675) 19(-2.75,-5.675) 20(-2.25,-5.675) 21(-1.75,-5.675) 22(-1.25,-5.675) 23(-0.75,-5.675) 24(-0.25,-5.675) 25(0.25,-5.675) 26(0.75,-5.675) 27(1.25,-5.675) 28(1.75,-5.675) 29(2.25,-5.675) 30(2.75,-5.675) 31(3.25,-5.675) 32(3.75,-5.675) 49(3.75,5.675) 50(3.25,5.675) 51(2.75,5.675) 52(2.25,5.675) 53(1.75,5.675) 54(1.25,5.675) 55(0.75,5.675) 56(0.25,5.675) 57(-0.25,5.675) 58(-0.75,5.675) 59(-1.25,5.675) 60(-1.75,5.675) 61(-2.25,5.675) 62(-2.75,5.675) 63(-3.25,5.675) 64(-3.75,5.675)
Top Overlay:
  lines w0.12: -5.11,-4.16 -5.11,-5.11 -4.16,-5.11 ; -5.11,4.16 -5.11,5.11 -4.16,5.11 ; 4.16,-5.11 5.11,-5.11 5.11,-4.16 ; 4.16,5.11 5.11,5.11 5.11,4.16 ; -6.09,4.63 -5.41,4.63 -5.75,4.16 -6.09,4.63
Top Courtyard:
  lines w0.05: -6.7,-4.15 -5.25,-4.15 -5.25,-5.25 -4.15,-5.25 -4.15,-6.7 4.15,-6.7 4.15,-5.25 5.25,-5.25 5.25,-4.15 6.7,-4.15 6.7,4.15 5.25,4.15 5.25,5.25 4.15,5.25 4.15,6.7 -4.15,6.7 -4.15,5.25 -5.25,5.25 -5.25,4.15 -6.7,4.15 -6.7,-4.15
Top Assembly:
  lines w0.1: -5,-5 5,-5 5,5 -4,5 -5,4 -5,-5
  lines w0.12: -6.098,4.68 -5.418,4.68 -5.758,4.21 -6.098,4.68
  text ".Designator" at -4.826,-2.159 h1
3D body "LQFP-64_10x10mm_P0.5mm.step": height 1.5, standoff 0, extent -6,-6 6,6

## MSD-1-A [mm]
pads (15):
  rect 0.6x1.6 smd: 1(2.325,7.825) 2(1.225,7.825) 3(0.125,7.825) 4(-0.975,7.825) 5(-2.075,7.825) 6(-3.175,7.825) 7(-4.275,7.825) 8(-5.375,7.825) 9(-6.475,7.825)
  round 0 hole 1 unplated: 14(-4.874,-3.175) 15(3.126,-3.175)
  rect 1.2x2.2 smd: SH(-7.675,-2.775) SH(7.825,-2.775)
  rect 1.2x1.8 smd: SH(-7.675,6.525)
  rect 1.6x1.5 smd: SH(7.025,6.775)
Top Overlay:
  lines w0.12: 3.556,8.382 3.81,8.128 3.81,8.636 3.556,8.382
Top Courtyard:
  lines w0.05: -9.175,-8.775 -9.175,8.775 9.175,8.775 9.175,-8.775 -9.175,-8.775
3D body "Same_Sky_MSD-1-A.step": height 1.86, standoff -0.54, extent -7.948,-7.303 8.202,7.747

## Oscillator_SMD_ECS_2520MV-xxx-xx-4Pin_2.5x2.0mm [mm] "Miniature Crystal Clock Oscillator ECS 2520MV series, https://www.ecsxtal.com/store/pdf/ECS-2520MV.pdf"
pads (4):
  rrect50% 0.8x0.9 smd: 1(-0.725,0.925) 2(-0.725,-0.925) 3(0.725,-0.925) 4(0.725,0.925)
Top Overlay:
  lines w0.12: -1.11,-0.32 -1.11,0.32 ; -1.07,1.56 -0.38,1.56 cw(c-0.47,1.24) -0.16,1.36 0.17,1.36 ; -0.17,-1.36 0.17,-1.36 ; 1.11,-0.32 1.11,0.32
Top Courtyard:
  lines w0.05: -1.38,-1.63 1.38,-1.63 1.38,1.63 -1.38,1.63 -1.38,-1.63
Top Assembly:
  lines w0.1: -1,-1.25 -1,0.75 -0.5,1.25 1,1.25 1,-1.25 -1,-1.25
  text ".Designator" at -1.905,-0.254 h0.5
3D body "ECS-2520MV-250-CN-TR.step": height 0.91, standoff 0.01, extent -1,-1.25 1,1.25

## PJ-342 [mm]
pads (8):
  round 0.025 smd: 2(2.2,3.6) 3(9.5,3.6) 4(11.5,3.3) 5(2.2,-3.6) 6(5.5,-3.6) 7(11,-3.6)
  round 0 hole 1.5 unplated: 3(2.4,0) 5(9.4,0)
Top Layer:
  region: 1.45,2.6 2.95,2.6 2.95,4.6 1.45,4.6
  region: 10.75,2 10.75,4.6 12.25,4.6 12.25,2
  region: 8.75,2.6 8.75,4.6 10.25,4.6 10.25,2.6
  region: 1.45,-4.6 1.45,-2.6 2.95,-2.6 2.95,-4.6
  region: 4.75,-4.6 4.75,-2.6 6.25,-2.6 6.25,-4.6
  region: 10.25,-4.6 11.75,-4.6 11.75,-2.6 10.25,-2.6
Top Assembly:
  circle w0.013: c2.4,0 r0.75
  circle w0.013: c9.4,0 r0.75
  lines w0.013: -0.5,0 0.5,0 ; 0,-0.5 0,0.5 ; -2,-2.6 -2,2.6 0,2.6 0,-2.6 -2,-2.6 ; 0,-3.2 0,3.2 12,3.2 12,-3.2 0,-3.2 ; 1.45,-4.6 1.45,-2.6 2.95,-2.6 2.95,-4.6 1.45,-4.6 ; 1.45,2.6 1.45,4.6 2.95,4.6 2.95,2.6 1.45,2.6 ; 4.75,-4.6 4.75,-2.6 6.25,-2.6 6.25,-4.6 4.75,-4.6 ; 8.75,2.6 8.75,4.6 10.25,4.6 10.25,2.6 8.75,2.6 ; 10.25,-4.6 10.25,-2.6 11.75,-2.6 11.75,-4.6 10.25,-4.6 ; 10.75,2 10.75,4.6 12.25,4.6 12.25,2 10.75,2
3D body "PJ311D_WPos.STEP": height 4.81, standoff -0.69, extent -2,-4.25 12.3,4.25

## QFN-32-1EP_5x5mm_P0.5mm_EP3.7x3.7mm [mm] "QFN, 32 Pin (https://www.espressif.com/sites/default/files/documentation/0a-esp8285_datasheet_en.pdf)"
pads (33):
  rrect50% 0.8x0.25 smd: 1(-2.45,1.75) 2(-2.45,1.25) 3(-2.45,0.75) 4(-2.45,0.25) 5(-2.45,-0.25) 6(-2.45,-0.75) 7(-2.45,-1.25) 8(-2.45,-1.75) 17(2.45,-1.75) 18(2.45,-1.25) 19(2.45,-0.75) 20(2.45,-0.25) 21(2.45,0.25) 22(2.45,0.75) 23(2.45,1.25) 24(2.45,1.75)
  rrect50% 0.25x0.8 smd: 9(-1.75,-2.45) 10(-1.25,-2.45) 11(-0.75,-2.45) 12(-0.25,-2.45) 13(0.25,-2.45) 14(0.75,-2.45) 15(1.25,-2.45) 16(1.75,-2.45) 25(1.75,2.45) 26(1.25,2.45) 27(0.75,2.45) 28(0.25,2.45) 29(-0.25,2.45) 30(-0.75,2.45) 31(-1.25,2.45) 32(-1.75,2.45)
  rect 3.7x3.7 smd paste-1.85: 33(0,0)
Top Overlay:
  lines w0.12: -2.61,-2.135 -2.61,-2.61 -2.135,-2.61 ; -2.61,2.135 -2.61,2.61 -2.135,2.61 ; 2.135,-2.61 2.61,-2.61 2.61,-2.135 ; 2.135,2.61 2.61,2.61 2.61,2.135 ; -3.44,1.51 -3.44,1.99 -3.11,1.75 -3.44,1.51
Top Paste:
  rectangle: 0.18,-1.67 1.67,-0.18
  rectangle: 0.18,0.18 1.67,1.67
  rectangle: -1.67,-1.67 -0.18,-0.18
  rectangle: -1.67,0.18 -0.18,1.67
Mechanical 15:
  lines w0.05: -3.1,-2.13 -2.75,-2.13 -2.75,-2.75 -2.13,-2.75 -2.13,-3.1 2.13,-3.1 2.13,-2.75 2.75,-2.75 2.75,-2.13 3.1,-2.13 3.1,2.13 2.75,2.13 2.75,2.75 2.13,2.75 2.13,3.1 -2.13,3.1 -2.13,2.75 -2.75,2.75 -2.75,2.13 -3.1,2.13 -3.1,-2.13
Top Assembly:
  lines w0.1: -2.5,-2.5 2.5,-2.5 2.5,2.5 -1.5,2.5 -2.5,1.5 -2.5,-2.5
  text ".Designator" at -4.318,-4.064 h1
3D body "QFN-32-1EP_5x5mm_P0.5mm_EP3.7x3.7mm.step": height 0.85, standoff 0, extent -2.5,-2.5 2.5,2.5

## QFN-48-1EP_7x7mm_P0.5mm_EP5.15x5.15mm [mm] "QFN, 48 Pin (http://www.analog.com/media/en/package-pcb-resources/package/pkg_pdf/ltc-legacy-qfn/QFN_48_05-08-1704.pdf)"
pads (49):
  rrect50% 0.875x0.25 smd: 1(-3.437,2.75) 2(-3.437,2.25) 3(-3.437,1.75) 4(-3.437,1.25) 5(-3.437,0.75) 6(-3.437,0.25) 7(-3.437,-0.25) 8(-3.437,-0.75) 9(-3.437,-1.25) 10(-3.437,-1.75) 11(-3.437,-2.25) 12(-3.437,-2.75) 25(3.437,-2.75) 26(3.437,-2.25) 27(3.437,-1.75) 28(3.437,-1.25) 29(3.437,-0.75) 30(3.437,-0.25) 31(3.437,0.25) 32(3.437,0.75) 33(3.437,1.25) 34(3.437,1.75) 35(3.437,2.25) 36(3.437,2.75)
  rrect50% 0.25x0.875 smd: 13(-2.75,-3.437) 14(-2.25,-3.437) 15(-1.75,-3.437) 16(-1.25,-3.437) 17(-0.75,-3.437) 18(-0.25,-3.437) 19(0.25,-3.437) 20(0.75,-3.437) 21(1.25,-3.437) 22(1.75,-3.437) 23(2.25,-3.437) 24(2.75,-3.437) 37(2.75,3.437) 38(2.25,3.437) 39(1.75,3.437) 40(1.25,3.437) 41(0.75,3.437) 42(0.25,3.437) 43(-0.25,3.437) 44(-0.75,3.437) 45(-1.25,3.437) 46(-1.75,3.437) 47(-2.25,3.437) 48(-2.75,3.437)
  rect 5.15x5.15 smd paste-2.575: 49(0,0)
Top Overlay:
  lines w0.12: -3.61,-3.135 -3.61,-3.61 -3.135,-3.61 ; -3.61,3.135 -3.61,3.61 -3.135,3.61 ; 3.135,-3.61 3.61,-3.61 3.61,-3.135 ; 3.135,3.61 3.61,3.61 3.61,3.135 ; -4.47,2.51 -4.14,2.75 -4.47,2.99 -4.47,2.51
Top Paste:
  rectangle: -2.455,1.415 -1.415,2.455
  rectangle: -2.455,0.125 -1.415,1.165
  rectangle: -2.455,-1.165 -1.415,-0.125
  rectangle: -2.455,-2.455 -1.415,-1.415
  rectangle: -1.165,1.415 -0.125,2.455
  rectangle: -1.165,0.125 -0.125,1.165
  rectangle: -1.165,-1.165 -0.125,-0.125
  rectangle: -1.165,-2.455 -0.125,-1.415
  rectangle: 0.125,1.415 1.165,2.455
  rectangle: 0.125,0.125 1.165,1.165
  rectangle: 0.125,-1.165 1.165,-0.125
  rectangle: 0.125,-2.455 1.165,-1.415
  rectangle: 1.415,1.415 2.455,2.455
  rectangle: 1.415,0.125 2.455,1.165
  rectangle: 1.415,-1.165 2.455,-0.125
  rectangle: 1.415,-2.455 2.455,-1.415
Top Courtyard:
  lines w0.05: -4.13,-3.13 -4.13,3.13 -3.75,3.13 -3.75,3.75 -3.13,3.75 -3.13,4.13 3.13,4.13 3.13,3.75 3.75,3.75 3.75,3.13 4.13,3.13 4.13,-3.13 3.75,-3.13 3.75,-3.75 3.13,-3.75 3.13,-4.13 -3.13,-4.13 -3.13,-3.75 -3.75,-3.75 -3.75,-3.13 -4.13,-3.13
Top Assembly:
  lines w0.1: -3.5,-3.5 -3.5,2.5 -2.5,3.5 3.5,3.5 3.5,-3.5 -3.5,-3.5
  text ".Designator" at -3.81,-1.905 h1
3D body "LAN8840_PSA.stp": height 1, standoff 0, extent -3.55,-3.55 3.55,3.55

## QFN-72-1EP_10x10mm_P0.5mm_EP4.7x4.7mm [mm] "QFN, 72 Pin (http://ww1.microchip.com/downloads/en/DeviceDoc/00001682C.pdf#page=70)"
pads (73):
  rrect50% 0.875x0.25 smd: 1(-4.938,4.25) 2(-4.938,3.75) 3(-4.938,3.25) 4(-4.938,2.75) 5(-4.938,2.25) 6(-4.938,1.75) 7(-4.938,1.25) 8(-4.938,0.75) 9(-4.938,0.25) 10(-4.938,-0.25) 11(-4.938,-0.75) 12(-4.938,-1.25) 13(-4.938,-1.75) 14(-4.938,-2.25) 15(-4.938,-2.75) 16(-4.938,-3.25) 17(-4.938,-3.75) 18(-4.938,-4.25) 37(4.938,-4.25) 38(4.938,-3.75) 39(4.938,-3.25) 40(4.938,-2.75) 41(4.938,-2.25) 42(4.938,-1.75) 43(4.938,-1.25) 44(4.938,-0.75) 45(4.938,-0.25) 46(4.938,0.25) 47(4.938,0.75) 48(4.938,1.25) 49(4.938,1.75) 50(4.938,2.25) 51(4.938,2.75) 52(4.938,3.25) 53(4.938,3.75) 54(4.938,4.25)
  rrect50% 0.25x0.875 smd: 19(-4.25,-4.938) 20(-3.75,-4.938) 21(-3.25,-4.938) 22(-2.75,-4.938) 23(-2.25,-4.938) 24(-1.75,-4.938) 25(-1.25,-4.938) 26(-0.75,-4.938) 27(-0.25,-4.938) 28(0.25,-4.938) 29(0.75,-4.938) 30(1.25,-4.938) 31(1.75,-4.938) 32(2.25,-4.938) 33(2.75,-4.938) 34(3.25,-4.938) 35(3.75,-4.938) 36(4.25,-4.938) 55(4.25,4.938) 56(3.75,4.938) 57(3.25,4.938) 58(2.75,4.938) 59(2.25,4.938) 60(1.75,4.938) 61(1.25,4.938) 62(0.75,4.938) 63(0.25,4.938) 64(-0.25,4.938) 65(-0.75,4.938) 66(-1.25,4.938) 67(-1.75,4.938) 68(-2.25,4.938) 69(-2.75,4.938) 70(-3.25,4.938) 71(-3.75,4.938) 72(-4.25,4.938)
  rect 4.7x4.7 smd paste-3: 73(0,0)
Top Overlay:
  lines w0.12: -5.11,-4.635 -5.11,-5.11 -4.635,-5.11 ; -5.11,4.635 -5.11,4.87 ; -4.813,5.11 -4.635,5.11 ; 4.635,-5.11 5.11,-5.11 5.11,-4.635 ; 4.635,5.11 5.11,5.11 5.11,4.635 ; -5.35,5.44 -5.11,5.11 -4.87,5.44 -5.35,5.44
Top Paste:
  rectangle: -2.159,0.254 -0.254,2.159
  rectangle: -2.159,-2.159 -0.254,-0.254
  rectangle: 0.254,-2.159 2.159,-0.254
  rectangle: 0.381,0.306 2.159,2.159
Top Courtyard:
  lines w0.05: -5.63,-4.63 -5.63,4.63 -5.25,4.63 -5.25,5.25 -4.63,5.25 -4.63,5.63 4.63,5.63 4.63,5.25 5.25,5.25 5.25,4.63 5.63,4.63 5.63,-4.63 5.25,-4.63 5.25,-5.25 4.63,-5.25 4.63,-5.63 -4.63,-5.63 -4.63,-5.25 -5.25,-5.25 -5.25,-4.63 -5.63,-4.63
Top Assembly:
  lines w0.1: -5,-5 5,-5 5,5 -4,5 -5,4 -5,-5
  text ".Designator" at -4.445,-3.048 h1
3D body "SiI9022ACNU.step": height 0.85, standoff 0, extent -5,-5 5,5